# EAGLE library part LM2596S (library rtd2660_board)
LM2596S buck regulator, TO-263-5 (tab = GND)
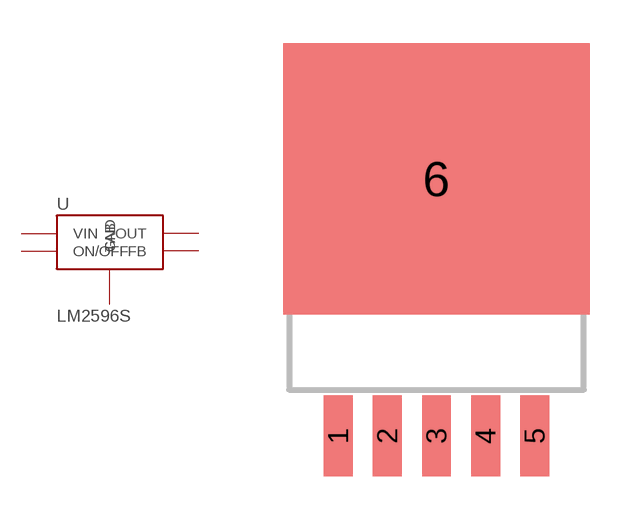
[diagram p8: symbol with the pads of TO263-5; footprint TO263-5]

Designator prefix U

## LM2596S  [TO263-5]
1  VIN  pas
2  OUT  pas
3  GND  pas
4  FB  pas
5  ON/OFF  pas
6  TAB  pas

## Footprint TO263-5 (pad centres in mm)
TO-263-5 (D2PAK-5); tab = pad 6
smd 1 x 2.8: 1 -3.4,-6.5; 2 -1.7,-6.5; 3 0,-6.5; 4 1.7,-6.5; 5 3.4,-6.5
smd 10.6 x 9.4: 6 0,2.4